# Altium schematic symbol library G4C_NANO.SchLib: 1 symbol
Pins are listed as number, name and electrical type; pins without a type are passive.

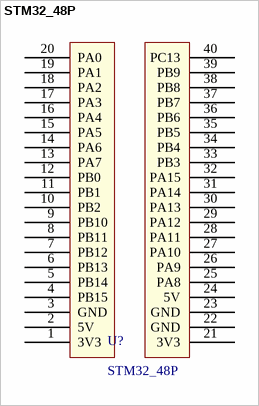
[diagram p0: symbol STM32_48P]

## STM32_48P
designator U?
pins: 1 3V3, 2 5V, 3 GND, 4 PB15, 5 PB14, 6 PB13, 7 PB12, 8 PB11, 9 PB10, 10 PB2, 11 PB1, 12 PB0, 13 PA7, 14 PA6, 15 PA5, 16 PA4, 17 PA3, 18 PA2, 19 PA1, 20 PA0, 21 3V3, 22 GND, 23 GND, 24 5V, 25 PA8, 26 PA9, 27 PA10, 28 PA11, 29 PA12, 30 PA13, 31 PA14, 32 PA15, 33 PB3, 34 PB4, 35 PB5, 36 PB6, 37 PB7, 38 PB8, 39 PB9, 40 PC13